# Altium schematic symbol library CBJ70.SchLib: 1 symbol
Pins are listed as number, name and electrical type; pins without a type are passive.

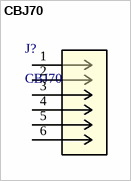
[diagram p0: symbol CBJ70]

## CBJ70
designator J?
Description; Manufacturer_Name: Cinch Connectivity Solutions; Copyright: Copyright (C) 2025 Ultra Librarian. All rights reserved.; Manufacturer_Part_Number: CBJ70; RefDes: RefDes; Type: Type
footprint CONN_CBJ70_CIN
pins: 1, 2, 3, 4, 5, 6